# EAGLE library part 5747845-6 (library 5747845-6)
Body Features: Insert Material Zinc | Mating Feature Material Zinc | Shell Plating Material Tin | Connector Profile Standard | Mating Feature Plating Material Clear Chromate | Assembly Process Feature Material Copper Alloy | Primary Product Color Black | Configuration Features: Number of Positions 15 | PCB Mount Orientation Right Angle | Number of Rows 2 | Contact Features: Contact Shape & Form Round | Contact Mating Area Plating Material Gold | PCB Contact Termination Area Plating Material Tin | Contact Ma Source: Datasheet <https://www.te.com/commerce/DocumentDelivery/DDEController?Action=srchrtrv&DocNm=82068_AMPLIMITE_Right-Angle_Posted_Conn&DocType=Catalog Section&DocLang=English&PartCntxt=5747845-6&DocFormat=pdf>
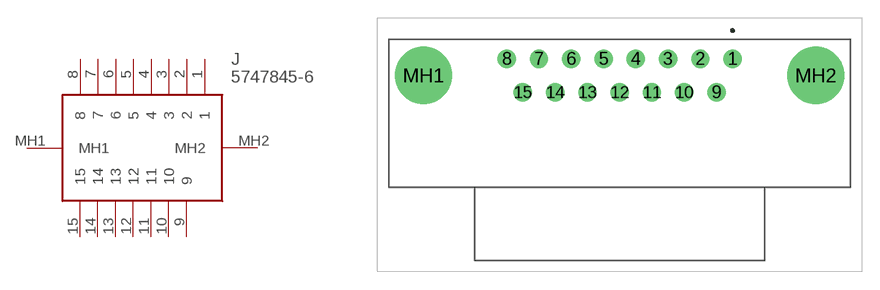
[diagram p0: symbol with the pads of 57478456; footprint 57478456]

Designator prefix J

## 5747845-6 (Description: Body Features: Insert Material Zinc | Mating Feature Material Zinc | Shell Plating Material Tin | Connector Profile Standard | Mating Feature Plating Material Clear Chromate | Assembly Process Feature Material Copper Alloy | Primary Product Color Black | Configuration Features: Number of Positions 15 | PCB Mount Orientation Right Angle | Number of Rows 2 | Contact Features: Contact Shape & Form Round | Contact Mating Area Plating Material Gold | PCB Contact Termination Area Plating Material Tin | Contact Ma; Height: 12.929mm; Manufacturer_Name: TE Connectivity; Manufacturer_Part_Number: 5747845-6; Mouser_Part_Number: 571-5747845-6; Mouser_Price-Stock: https://www.mouser.co.uk/ProductDetail/TE-Connectivity/5747845-6?qs=x6EjVpvqMVN9cHT7h3fiVQ%3D%3D)  [57478456]
1  1
2  2
3  3
4  4
5  5
6  6
7  7
8  8
9  9
10  10
11  11
12  12
13  13
14  14
15  15
MH1  MH1
MH2  MH2

## Footprint 57478456 (pad centres in mm)
5747845-6-3
drill 1.04 pad 1.56: 1 0,0; 2 -2.74,0; 3 -5.48,0; 4 -8.22,0; 5 -10.96,0; 6 -13.7,0; 7 -16.44,0; 8 -19.18,0; 9 -1.37,-2.84; 10 -4.11,-2.84; 11 -6.85,-2.84; 12 -9.59,-2.84; 13 -12.33,-2.84; 14 -15.07,-2.84; 15 -17.81,-2.84
drill 3.25 pad 4.875: MH1 -26.25,-1.42; MH2 7.07,-1.42